# Altium schematic symbol library Schlib.SchLib: 13 symbols
Pins are listed as number, name and electrical type; pins without a type are passive.

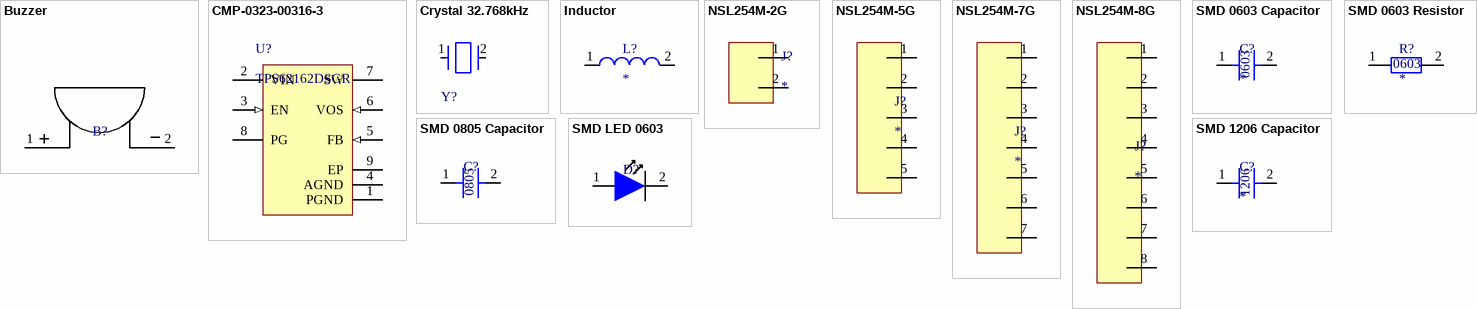
[diagram p0: symbols Buzzer to SMD LED 0603]

## Buzzer
designator B?  (value not drawn)
5V buzzer
footprint Buzzer (12mm)
pins: 1 49, 2 48

## CMP-0323-00316-3
designator U?, comment TPS62162DSGR
Buck Step Down Regulator with 3 to 17 V Input and 3.3 V Output, -40 to 85 degC, 8-Pin WSON (DSG), Green (RoHS & no Sb/Br); Manufacturer: Texas Instruments; SubFamily: Step-Down Regulator; Synchronous Rectification: TRUE; Vout(Max)(V): 3.3; Regulated Outputs(#): 1; Switch Current Limit(Typ)(A): 1.8; Duty Cycle(Max)(%): 100; Iq(Typ)(mA): 0.017; Rating: Catalog; Vin(Min)(V): 3; Vin(Max)(V): 17; ComponentLink2URL: http://www.ti.com/litv/pdf/mpds308a; ComponentLink3URL: Samples URL:http://www.ti.com/product/tps62162#samples; Eco-Plan: Green (RoHS & no Sb/Br); PackageDescription: 8-Pin Plastic Small Outline No-Lead, 2 x 2 x 0.8 mm Body, 0.5 mm Pitch, Exposed Pad; DatasheetVersion: SLVSAM2A; Topology: Buck; PartNumber: TPS62162DSGR; PackageReference: DSG0008A; ComponentLink1URL: http://www.ti.com/general/docs/lit/getliterature.tsp?genericPartNumber=TPS62162&fileType=pdf; PackageVersion: revB, Oct-2010; Mounting Technology: Surface Mount; Code_JEDEC: MO-229; Iout(Max)(A): 1; ComponentLink1Description: Datasheet; ComponentLink2Description: Package Specification; Vout(Min)(V): 3.3; ComponentLink3Description: URL Link1; Preset Vout(V): 3.3
footprint DSG0008A_V (SON, 8-Leads, Body 2x2mm, Pitch 0.5mm, Thermal Pad 1.6x0.9mm, TI Recommended)
pins: 1 PGND (power) "Power ground", 2 VIN (power) "Supply voltage", 3 EN (in) "Enable input (High = enabled, Low = disabled)", 4 AGND (power) "Analog Ground", 5 FB (in) "Voltage feedback of adjustable version. Connect resistive voltage divider to this pin. It is recommended to connect FB to AGND on fixed output voltage versions for improved thermal performance.", 6 VOS (in) "Output voltage sense pin and connection for the control loop circuitry.", 7 SW (power) "Switch node, which is connected to the internal MOSFET switches.Connect inductor between SW and output capacitor.", 8 PG (hiz) "Output power good (High = VOUT ready, Low = VOUT below nominal regulation) ; open drain (requires pull-up resistor; goes high impedance, when device is switched off)", 9 EP (power) "Must be connected to AGND. Must be soldered to achieve appropriate power dissipation and mechanical Thermal Pad reliability."

## Crystal 32.768kHz
designator Y?
Crystal 32.768kHz 3.2mm x 1.5mm; ESR (Equivalent Series Resistance): 50kR; Load Capacitance: 6pF; Frequency Tolerance: 20ppm; Frequency: 32.768kHz; RoHS Compliant: Yes; Case/Package: SMD/SMT; Max Operating Temperature: 85°C; Series: ABS07-LR; Min Operating Temperature: -40°C; Packaging: Cut Tape; Height: 0.035inch; Width: 0.061inch; Length: 0.126inch; Mount: Surface Mount
footprint FP-ABS07-MFG
pins: 1, 2

## Inductor
designator L?
pins: 1 3, 2 4

## NSL254M-2G
designator J?
2pin, 2.54mm THT connector
footprint NSL254M-2G (2pin, 2.54mm THT connector)
pins: 1 42, 2 43

## NSL254M-5G
designator J?
5pin, 2.54mm THT connector
footprint NSL254M-5G (5pin, 2.54mm THT connector)
pins: 1 42, 2 43, 3 44, 4 45, 5 45

## NSL254M-7G
designator J?
7pin, 2.54mm THT connector
footprint NSL254M-7G (7pin, 2.54mm THT connector)
pins: 1 42, 2 43, 3 44, 4 45, 5 45, 6, 7

## NSL254M-8G
designator J?
7pin, 2.54mm THT connector
footprint NSL254M-8G (8pin, 2.54mm THT connector)
pins: 1 42, 2 43, 3 44, 4 45, 5 45, 6, 7, 8

## SMD 0603 Capacitor
designator C?
0603 capacitor
footprint CAPACITOR_SMD_0603
pins: 1, 2
text: 0603

## SMD 0603 Resistor
designator R?
0603 resistor
footprint RESISTOR_SMD_0603
pins: 1, 2
text: 0603

## SMD 0805 Capacitor
designator C?  (value not drawn)
footprint CAPACITOR_SMD_0805_IPC (Chip Capacitor, 2-Leads, Body 2,00x1,25mm, IPC Medium Density)
pins: 1, 2
text: 0805

## SMD 1206 Capacitor
designator C?
1206 capacitor
footprint CAPACITOR_SMD_1206
pins: 1, 2
text: 1206

## SMD LED 0603
designator D?  (value not drawn)
0603 LED
footprint 0603 LED (standard 0603 LED)
pins: 1, 2